# EAGLE library part LMP91000SDX_NOPB (library LMP91000SDX_NOPB)
Sensor AFE System Analog Output 3.3V/5V 14-Pin WSON EP T/R Source: Datasheet <https://www.arrow.com/en/products/lmp91000sdxnopb/texas-instruments>
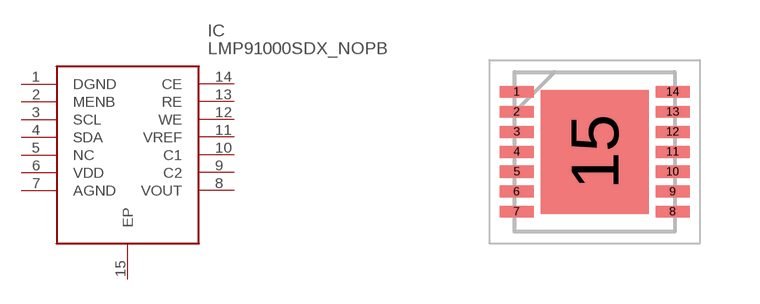
[diagram p0: symbol with the pads of SON50P400X400X80-15N; footprint SON50P400X400X80-15N]

Designator prefix IC

## LMP91000SDX_NOPB (Description: Sensor AFE System Analog Output 3.3V/5V 14-Pin WSON EP T/R; Height: 0.8mm; Manufacturer_Name: Texas Instruments; Manufacturer_Part_Number: LMP91000SDX/NOPB; Mouser_Part_Number: 926-LMP91000SDX/NOPB; Mouser_Price-Stock: https://www.mouser.co.uk/ProductDetail/Texas-Instruments/LMP91000SDX-NOPB?qs=7lkVKPoqpbYmeZ1SbPtg0w%3D%3D)  [SON50P400X400X80-15N]
1  DGND
2  MENB
3  SCL
4  SDA
5  NC  nc
6  VDD
7  AGND
8  VOUT
9  C2
10  C1
11  VREF
12  WE
13  RE
14  CE
15  EP

## Footprint SON50P400X400X80-15N (pad centres in mm)
NHL0014B
smd 0.85 x 0.3: 1 -1.95,1.5; 2 -1.95,1; 3 -1.95,0.5; 4 -1.95,0; 5 -1.95,-0.5; 6 -1.95,-1; 7 -1.95,-1.5; 8 1.95,-1.5; 9 1.95,-1; 10 1.95,-0.5; 11 1.95,0; 12 1.95,0.5; 13 1.95,1; 14 1.95,1.5
smd 2.7 x 3.1: 15 0,0